# Altium footprint library SamacSys.PcbLib: 1008 footprints (part 32 of 63)
Each footprint in its own frame and in the unit in brackets; x right, y up, seen from the top. Pads: shape width x height; smd on the part's side, far side on the other; paste and mask are expansions set on the pad; w line width, h text height; cw(c..) or ccw(c..) is an arc to the next point about the centre after c.
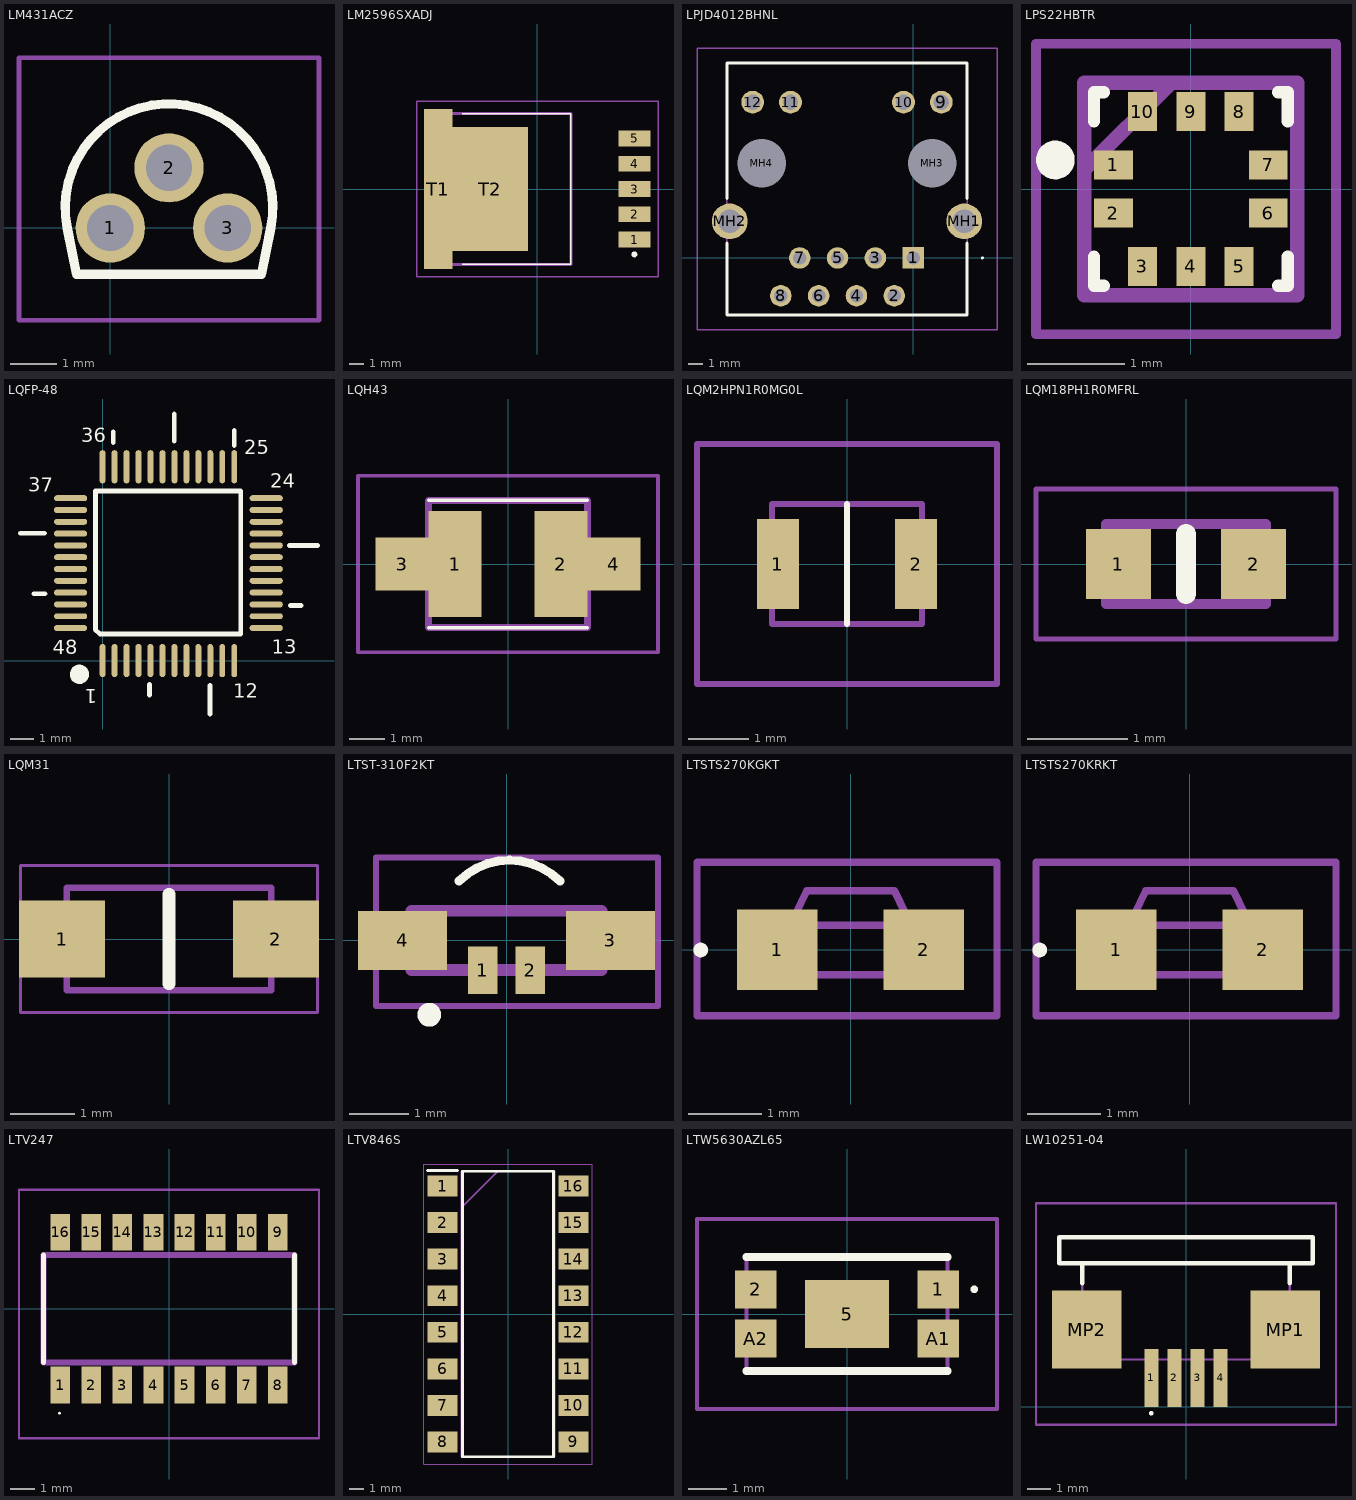
[diagram p31: the footprints below, top view; thin cyan lines are the x and y axes]

## LM431ACZ [mm]
pads (3):
  round 1.5 hole 1: 1(0,0) 2(1.27,1.3) 3(2.54,0)
Top Overlay:
  lines w0.2: -0.931,0 cw(c1.27,0.44) 3.471,0 ; -0.93,0 -0.73,-1 3.27,-1 3.47,0
Assembly:
  lines w0.1: -0.931,0 cw(c1.27,0.44) 3.471,0 ; -0.93,0 -0.73,-1 3.27,-1 3.47,0
Countryard:
  lines w0.1: -1.974,-2 -1.974,3.684 4.514,3.684 4.514,-2 -1.974,-2
3D body "2N3904BU.stp": height 6.11, standoff -14.84, extent -1.39,-1.64 3.93,2.549

## LM2596SXADJ [mm]
pads (7):
  rect 2.16x1.07 smd: 1(6.545,-3.4) 2(6.545,-1.7) 3(6.545,0) 4(6.545,1.7) 5(6.545,3.4)
  rect 1.91x10.8 smd: T1(-6.67,0)
  rect 5.08x8.33 smd: T2(-3.175,0)
Top Overlay:
  lines w0.1: -5.063,-5.08 2.258,-5.08 2.258,5.08 -5.063,5.08
  lines w0.2: 6.437,-4.4 ccw(c6.537,-4.4) 6.637,-4.4 ccw(c6.537,-4.4) 6.437,-4.4
Assembly:
  lines w0.2: -6.383,-5.08 2.258,-5.08 2.258,5.08 -6.383,5.08 -6.383,-5.08
Countryard:
  lines w0.1: -8.125,-5.9 8.125,-5.9 8.125,5.9 -8.125,5.9 -8.125,-5.9
3D body "LM2596S-ADJ_NOPB.stp": height 4.8, standoff 0, extent -7.2,-5.21 7.192,5.2

## LPJD4012BHNL [mm]
pads (16):
  rect 1.446x1.446 hole 0.89: 1(0,0)
  round 1.446 hole 0.89: 2(-1.27,-2.54) 3(-2.54,0) 4(-3.81,-2.54) 5(-5.08,0) 6(-6.35,-2.54) 7(-7.62,0) 8(-8.89,-2.54)
  round 1.53 hole 1.02: 9(1.89,10.46) 10(-0.65,10.46) 11(-8.24,10.46) 12(-10.78,10.46)
  round 2.4 hole 1.6: MH1(3.43,2.46) MH2(-12.32,2.46)
  round 1.625 hole 3.25 unplated: MH3(1.27,6.35) MH4(-10.16,6.35)
Top Overlay:
  lines w0.1: 4.6,0 cw(c4.65,0) 4.7,0 cw(c4.65,0) 4.6,0
  lines w0.2: -12.52,1 -12.52,-3.82 3.63,-3.82 3.63,1 ; -12.52,4 -12.52,13.08 3.63,13.08 3.63,4
Assembly:
  lines w0.1: -12.52,-3.82 -12.52,13.08 3.63,13.08 3.63,-3.82 -12.52,-3.82
Countryard:
  lines w0.1: -14.52,-4.82 -14.52,14.08 5.63,14.08 5.63,-4.82 -14.52,-4.82
3D body "LPJD4012BHNL.stp": height 17.35, standoff -5, extent -13.02,-3.82 4.13,13.08

## LPS22HBTR [mm]
pads (10):
  rect 0.4x0.3 smd: 1(-0.8,0.25) 2(-0.8,-0.25) 6(0.8,-0.25) 7(0.8,0.25)
  rect 0.3x0.4 smd: 3(-0.5,-0.8) 4(0,-0.8) 5(0.5,-0.8) 8(0.5,0.8) 9(0,0.8) 10(-0.5,0.8)
Top Overlay:
  circle w0.2: c-1.4,0.3 r0.1
  lines w0.127: -1,-0.7 -1,-1 -0.9,-1 ; -1,0.7 -1,1 -0.9,1 ; 0.9,-1 1,-1 1,-0.7 ; 0.9,1 1,1 1,0.7
Assembly:
  lines w0.15: -1.1,0.2 -0.2,1.1 ; -1.1,-1.1 1.1,-1.1 1.1,1.1 -1.1,1.1 -1.1,-1.1
Countryard:
  lines w0.1: -1.6,-1.5 1.5,-1.5 1.5,1.5 -1.6,1.5 -1.6,-1.5
3D body "HLGA10_2X2_STM.step": height 0.81, standoff 0, extent -1.054,-1.054 1.054,1.054

## LQFP-48 [mm] "7*7mm"
pads (48):
  oval 0.25x1.4 smd: 1(0,0) 2(0.505,0) 3(1.009,0) 4(1.514,0) 5(2.018,0) 6(2.523,0) 7(3.027,0) 8(3.532,0) 9(4.036,0) 10(4.541,0) 11(5.045,0) 12(5.55,0) 25(5.55,8.175) 26(5.045,8.175) 27(4.541,8.175) 28(4.036,8.175) 29(3.532,8.175) 30(3.027,8.175) 31(2.523,8.175) 32(2.018,8.175) 33(1.514,8.175) 34(1.009,8.175) 35(0.505,8.175) 36(0,8.175)
  oval 1.4x0.25 smd: 13(6.9,1.375) 14(6.9,1.873) 15(6.9,2.37) 16(6.9,2.868) 17(6.9,3.366) 18(6.9,3.864) 19(6.9,4.361) 20(6.9,4.859) 21(6.9,5.357) 22(6.9,5.855) 23(6.9,6.352) 24(6.9,6.85) 37(-1.35,6.85) 38(-1.35,6.352) 39(-1.35,5.855) 40(-1.35,5.357) 41(-1.35,4.859) 42(-1.35,4.361) 43(-1.35,3.864) 44(-1.35,3.366) 45(-1.35,2.868) 46(-1.35,2.37) 47(-1.35,1.873) 48(-1.35,1.375)
Top Overlay:
  circle w0.4: c-0.975,-0.575 r0.206
  lines w0.2: -3.475,5.375 -2.45,5.375 ; -2.9,2.825 -2.425,2.825 ; 0.45,9.2 0.45,9.65 ; 0.75,7.15 5.825,7.15 5.825,1.125 -0.125,1.125 -0.3,1.3 -0.3,7.15 0.8,7.15 ; 1.975,-1.45 1.975,-1 ; 3.025,9.25 3.025,10.4 ; 4.525,-2.25 4.525,-1.05 ; 5.55,9.075 5.55,9.7 ; 7.875,4.85 9.075,4.85 ; 7.925,2.325 8.375,2.325
  text "1" at -0.225,-1.2 h0.6
  text "12" at 5.5,-1.575 h0.6
  text "13" at 7.125,0.3 h0.6
  text "24" at 7.075,7.3 h0.6
  text "25" at 5.975,8.7 h0.6
  text "36" at -0.9,9.2 h0.6
  text "37" at -3.125,7.125 h0.6
  text "48" at -2.1,0.275 h0.6

## LQH43 [mm]
pads (4):
  rect 1.5x3 smd: 1(-1.5,0) 2(1.5,0)
  rect 1.5x1.5 smd: 3(-3,0) 4(3,0)
Top Overlay:
  lines w0.1: -2.25,-1.8 2.25,-1.8 ; -2.25,1.8 2.25,1.8
Assembly:
  lines w0.2: -2.25,-1.8 2.25,-1.8 2.25,1.8 -2.25,1.8 -2.25,-1.8
Countryard:
  lines w0.1: -4.25,-2.5 4.25,-2.5 4.25,2.5 -4.25,2.5 -4.25,-2.5
3D body "LQH43MN150K03L.stp": height 2.8, standoff 0, extent -2.25,-1.9 2.25,1.9

## LQM2HPN1R0MG0L [mm]
pads (2):
  rect 0.7x1.5 smd: 1(-1.15,0) 2(1.15,0)
Top Overlay:
  lines w0.1: 0,-1 0,1
Assembly:
  lines w0.1: -1.25,-1 1.25,-1 1.25,1 -1.25,1 -1.25,-1
Countryard:
  lines w0.1: -2.5,-2 2.5,-2 2.5,2 -2.5,2 -2.5,-2
3D body "LQM2HPN3R3MG0L.stp": height 0.91, standoff 0.01, extent -1.25,-1 1.25,1

## LQM18PH1R0MFRL [mm]
pads (2):
  rect 0.65x0.7 smd: 1(-0.675,0) 2(0.675,0)
Top Overlay:
  lines w0.2: 0,-0.3 0,0.3
Assembly:
  lines w0.1: -0.8,-0.4 -0.8,0.4 0.8,0.4 0.8,-0.4 -0.8,-0.4
Countryard:
  lines w0.05: -1.5,-0.75 -1.5,0.75 1.5,0.75 1.5,-0.75 -1.5,-0.75
3D body "LQG18HN3N3S00D.stp": height 0.95, standoff 0, extent -0.8,-0.4 0.8,0.4

## LQM31 [mm]
pads (2):
  rect 1.35x1.2 smd: 1(-1.675,0) 2(1.675,0)
Top Overlay:
  lines w0.2: 0,-0.7 0,0.7
Assembly:
  lines w0.1: -1.6,-0.8 1.6,-0.8 1.6,0.8 -1.6,0.8 -1.6,-0.8
Countryard:
  lines w0.05: -2.325,-1.15 2.325,-1.15 2.325,1.15 -2.325,1.15 -2.325,-1.15
3D body "LQM31PN4R7M00L.stp": height 0.95, standoff 0, extent -1.6,-0.8 1.6,0.8

## LTST-310F2KT [mm]
pads (4):
  rect 0.5x0.8 smd: 1(-0.4,-0.5) 2(0.4,-0.5)
  rect 1.5x1 smd: 3(1.75,0) 4(-1.75,0)
Top Overlay:
  lines w0.15: -0.8,1 cw(c0.049,0.151) 0.897,1
  lines w0.2: -1.3,-1.35 cw(c-1.3,-1.25) -1.3,-1.15 cw(c-1.3,-1.25) -1.3,-1.35
Assembly:
  lines w0.2: -1.6,-0.5 -1.6,0.5 1.6,0.5 1.6,-0.5 -1.6,-0.5
Countryard:
  lines w0.1: -2.2,-1.1 -2.2,1.4 2.55,1.4 2.55,-1.1 -2.2,-1.1
3D body "LTST-S310F2KT.stp": height 0.98, standoff -0.02, extent -1.6,-0.31 1.6,1.193

## LTSTS270KGKT [mm]
pads (2):
  rect 1.1x1.1 smd: 1(-1,0) 2(1,0)
Top Overlay:
  lines w0.1: -2.1,0 ccw(c-2.05,0) -2,0 ccw(c-2.05,0) -2.1,0
Assembly:
  lines w0.1: -0.825,0.34 -0.6,0.81 0.6,0.81 0.825,0.34 ; -0.825,0.34 -0.825,-0.34 0.825,-0.34 0.825,0.34 ; -0.825,0.34 0.825,0.34
Countryard:
  lines w0.1: -2.1,-0.9 -2.1,1.2 2,1.2 2,-0.9 -2.1,-0.9
3D body "LTST-S270KGKT.stp": height 0.6, standoff 0, extent -0.825,-0.3 0.825,0.85

## LTSTS270KRKT [mm]
pads (2):
  rect 1.1x1.1 smd: 1(-1,0) 2(1,0)
Top Overlay:
  lines w0.1: -2.1,0 cw(c-2.05,0) -2,0 cw(c-2.05,0) -2.1,0
Assembly:
  lines w0.1: -0.825,0.34 0.825,0.34 ; -0.825,0.34 -0.825,-0.34 0.825,-0.34 0.825,0.34 ; -0.825,0.34 -0.6,0.81 0.6,0.81 0.825,0.34
Countryard:
  lines w0.1: -2.1,-0.9 2,-0.9 2,1.2 -2.1,1.2 -2.1,-0.9
3D body "LTST-S270KGKT.stp": height 0.6, standoff 0, extent -0.825,-0.3 0.825,0.85

## LTV247 [mm]
pads (16):
  rect 0.8x1.5 smd: 1(-4.445,-3.125) 2(-3.175,-3.125) 3(-1.905,-3.125) 4(-0.635,-3.125) 5(0.635,-3.125) 6(1.905,-3.125) 7(3.175,-3.125) 8(4.445,-3.125) 9(4.445,3.125) 10(3.175,3.125) 11(1.905,3.125) 12(0.635,3.125) 13(-0.635,3.125) 14(-1.905,3.125) 15(-3.175,3.125) 16(-4.445,3.125)
Top Overlay:
  lines w0.061: -4.507,-4.278 ccw(c-4.477,-4.278) -4.447,-4.278 ccw(c-4.477,-4.278) -4.507,-4.278
  lines w0.2: -5.14,-2.2 -5.14,2.2 ; 5.14,-2.2 5.14,2.2
Assembly:
  lines w0.254: -5.14,-2.2 5.14,-2.2 5.14,2.2 -5.14,2.2 -5.14,-2.2
Countryard:
  lines w0.1: -6.14,-5.308 6.14,-5.308 6.14,4.875 -6.14,4.875 -6.14,-5.308
3D body "LTV-247.stp": height 2.13, standoff 0, extent -5.01,-3.5 5.27,3.5

## LTV846S [mm]
pads (16):
  rect 2.1x1.45 smd: 1(-4.55,8.89) 2(-4.55,6.35) 3(-4.55,3.81) 4(-4.55,1.27) 5(-4.55,-1.27) 6(-4.55,-3.81) 7(-4.55,-6.35) 8(-4.55,-8.89) 9(4.55,-8.89) 10(4.55,-6.35) 11(4.55,-3.81) 12(4.55,-1.27) 13(4.55,1.27) 14(4.55,3.81) 15(4.55,6.35) 16(4.55,8.89)
Top Overlay:
  lines w0.2: -5.6,9.965 -3.5,9.965 ; -3.15,-9.92 3.15,-9.92 3.15,9.92 -3.15,9.92 -3.15,-9.92
Assembly:
  lines w0.1: -3.25,7.38 -0.71,9.92 ; -3.25,-9.92 3.25,-9.92 3.25,9.92 -3.25,9.92 -3.25,-9.92
Countryard:
  lines w0.05: -5.85,-10.42 5.85,-10.42 5.85,10.42 -5.85,10.42 -5.85,-10.42
3D body "LTV847S.stp": height 4.6, standoff 0, extent -5.08,-9.92 5.08,9.92

## LTW5630AZL65 [mm]
pads (5):
  rect 1.1x1 smd: 1(2.4,0.65) 2(-2.4,0.65) A1(2.4,-0.65) A2(-2.4,-0.65)
  rect 2.2x1.8 smd: 5(0,0)
Top Overlay:
  lines w0.1: 3.3,0.65 cw(c3.35,0.65) 3.4,0.65 cw(c3.35,0.65) 3.3,0.65
  lines w0.2: -2.65,-1.5 2.65,-1.5 ; -2.65,1.5 2.65,1.5
Assembly:
  lines w0.1: -2.65,-1.5 2.65,-1.5 2.65,1.5 -2.65,1.5 -2.65,-1.5
Countryard:
  lines w0.1: -3.95,-2.5 3.95,-2.5 3.95,2.5 -3.95,2.5 -3.95,-2.5
3D body "LTW-5630AZL65.stp": height 0.9, standoff 0, extent -2.8,-1.5 2.8,1.5

## LW10251-04 [mm] "FFC 1mm 4pin"
pads (6):
  rect 0.6x2.5 smd: 1(-1.5,1.25) 2(-0.5,1.25) 3(0.5,1.25) 4(1.5,1.25)
  rect 3x3.4 smd: MP1(4.3,3.35) MP2(-4.3,3.35)
Top Overlay:
  lines w0.1: -1.5,-0.328 ccw(c-1.5,-0.278) -1.5,-0.228 ccw(c-1.5,-0.278) -1.5,-0.328
  lines w0.2: -5.5,7.322 -5.5,6.222 -4.5,6.222 ; -5.5,7.35 5.5,7.35 ; -4.5,5.362 -4.5,6.222 ; 4.5,5.362 4.5,6.222 ; 5.5,7.322 5.5,6.222 4.5,6.222 ; -4.5,6.222 4.5,6.222
Assembly:
  lines w0.1: -4.5,6.222 -4.5,2.05 4.5,2.05 4.5,6.222 ; -5.5,6.222 5.5,6.222 5.5,7.322 -5.5,7.322 -5.5,6.222
Countryard:
  lines w0.1: -6.5,-0.778 6.5,-0.778 6.5,8.822 -6.5,8.822 -6.5,-0.778
3D body "68610414422.stp": height 3.01, standoff 0, extent -5.5,0.472 5.5,7.572